# Altium footprint library SYNCBOX_V3I1.PcbLib: 251 footprints (part 6 of 16)
Each footprint in its own frame and in the unit in brackets; x right, y up, seen from the top. Pads: shape width x height; smd on the part's side, far side on the other; paste and mask are expansions set on the pad; w line width, h text height; cw(c..) or ccw(c..) is an arc to the next point about the centre after c.
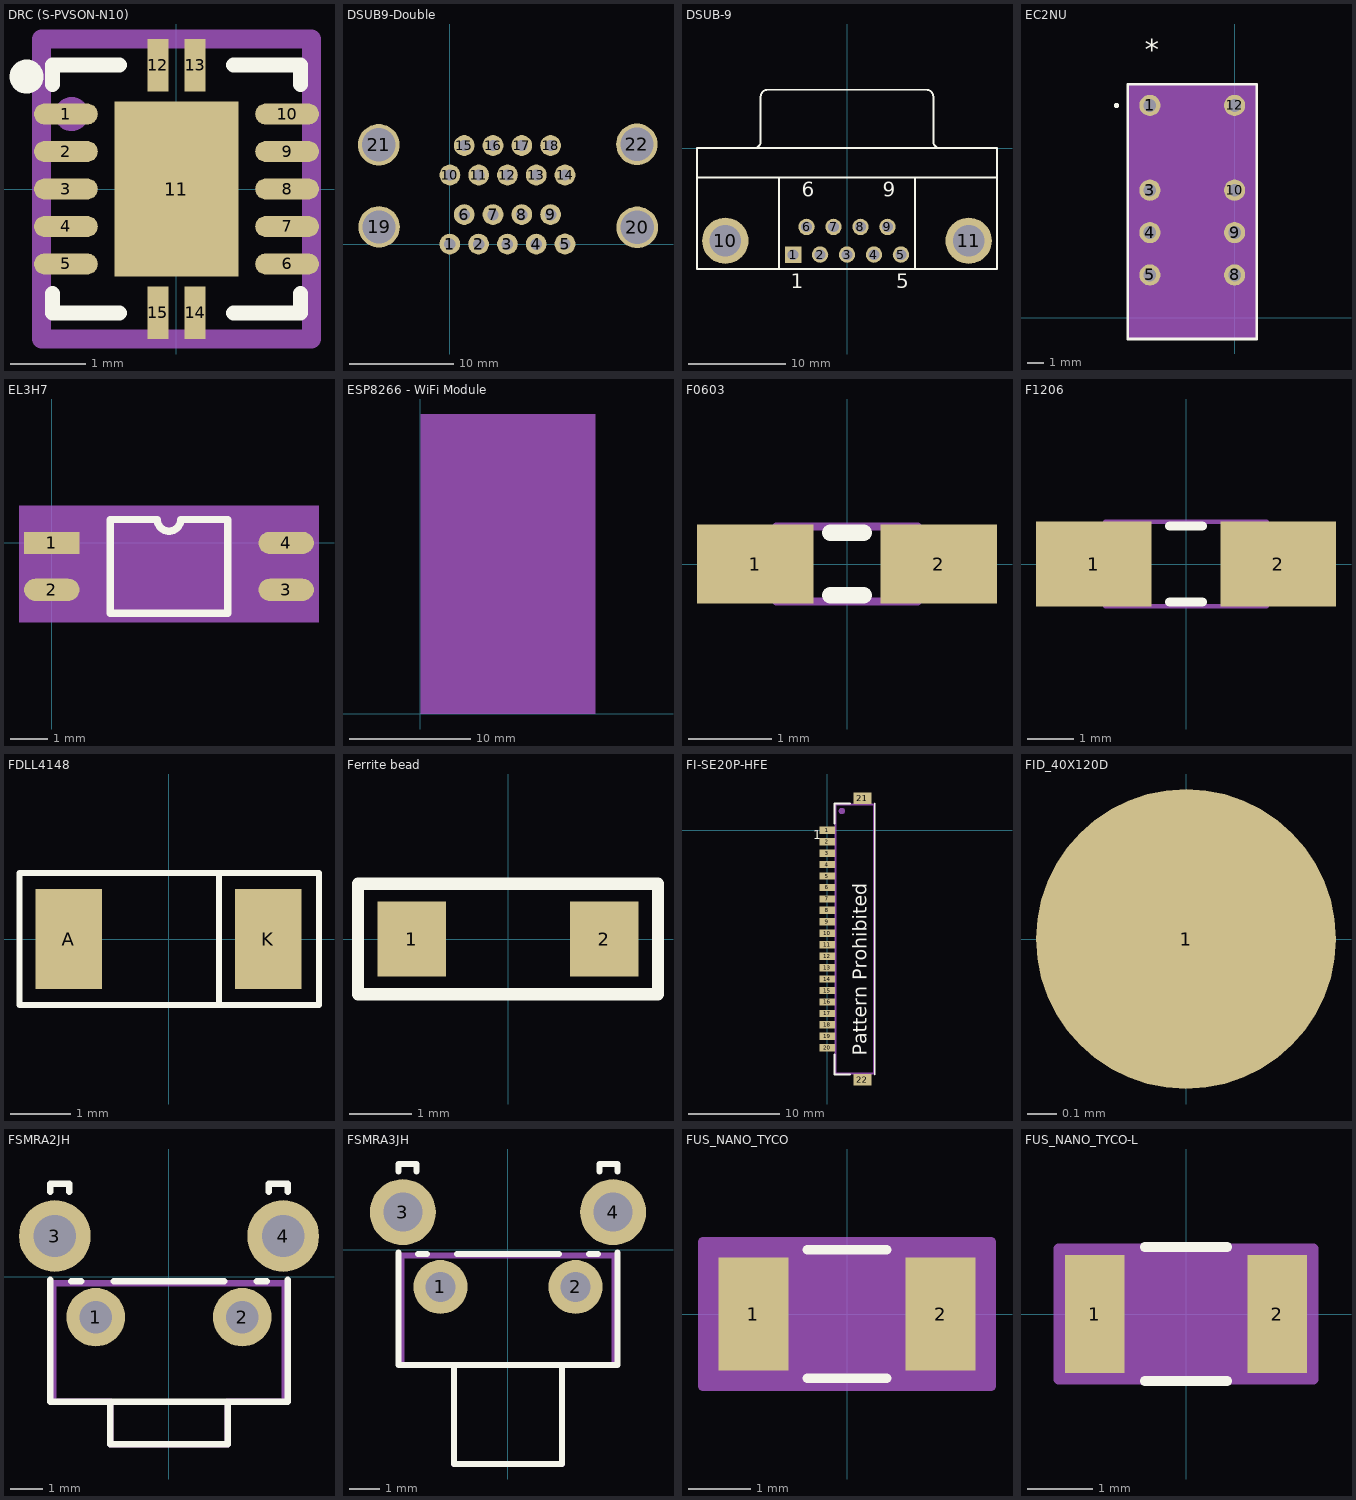
[diagram p5: the footprints below, top view; thin cyan lines are the x and y axes]

## DRC (S-PVSON-N10) [mm]
pads (15):
  oval 0.85x0.28 smd mask+0.025: 1(-1.475,1) 2(-1.475,0.5) 3(-1.475,0) 4(-1.475,-0.5) 5(-1.475,-1) 6(1.475,-1) 7(1.475,-0.5) 8(1.475,0) 9(1.475,0.5) 10(1.475,1)
  rect 1.65x2.337 smd paste-1.524 mask+0.025: 11(0,0)
  rect 0.28x0.7 smd mask+0.127: 12(-0.25,1.651) 13(0.25,1.651) 14(0.25,-1.651) 15(-0.25,-1.651)
Top Overlay:
  circle w0.254: c-2,1.5 r0.1
  lines w0.2: -1.651,-1.397 -1.651,-1.651 -0.762,-1.651 ; -1.651,1.397 -1.651,1.651 -0.762,1.651 ; 0.762,-1.651 1.651,-1.651 1.651,-1.397 ; 0.762,1.651 1.651,1.651 1.651,1.397
Top Paste:
  rectangle: -0.763,0.102 -0.102,1.143
  rectangle: -0.763,-1.143 -0.102,-0.102
  rectangle: 0.101,-1.143 0.761,-0.102
  rectangle: 0.101,0.102 0.761,1.143
Mechanical 16:
  circle w0.254: c-1.4,1 r0.1
  lines w0.254: -1.8,-2 1.8,-2 1.8,2 -1.8,2 -1.8,-2
Mechanical 29:
  text ".Designator" at -0.5,0.6 h1
3D body: height 1, standoff 0, extent -1.651,-1.651 1.651,1.651

## DSUB9-Double [mm] "Double Stacked D-Sub Connector 2x9"
pads (22):
  round 2 hole 1.1: 1(-0.01,-0.005) 2(2.765,-0.005) 3(5.54,-0.005) 4(8.315,-0.005) 5(11.09,0) 6(1.377,2.84) 7(4.152,2.84) 8(6.927,2.84) 9(9.702,2.84) 10(0,6.65) 11(2.772,6.65) 12(5.545,6.65) 13(8.317,6.65) 14(11.09,6.65) 15(1.377,9.49) 16(4.152,9.49) 17(6.927,9.49) 18(9.702,9.49)
  round 4 hole 3.2: 19(-6.82,1.65) 20(18.05,1.61) 21(-6.855,9.56) 22(18.02,9.61)
3D body "178-009-613.STEP": height 32.57, standoff -2.38, extent -9.815,-1.585 20.995,23.815

## DSUB-9 [mm] "Connector; D Subminiature; 9 Position; Right Angle; Pitch 1.385 mm"
height 12.75
pads (11):
  rect 1.69x1.69 hole 1.09: 1(-5.54,-10.92)
  round 1.69 hole 1.09: 2(-2.77,-10.92) 3(0,-10.92) 4(2.77,-10.92) 5(5.54,-10.92) 6(-4.155,-8.08) 7(-1.385,-8.08) 8(1.385,-8.08) 9(4.155,-8.08)
  round 4.76 hole 3.26: 10(-12.495,-9.5) 11(12.495,-9.5)
Top Overlay:
  lines w0.2: -15.4,-3 15.4,-3 ; -9.56,0.005 ccw(c-9.56,0.7) -8.865,0.7 -8.865,5.3 ; -8.86,5.305 cw(c-8.165,5.305) -8.165,6 8.165,6 cw(c8.165,5.305) 8.86,5.305 ; -7,-12.4 -7,-3 ; 7,-12.4 7,-3 ; 8.865,5.3 8.865,0.7 ccw(c9.56,0.7) 9.56,0.005 ; -15.4,-12.4 15.4,-12.4 15.4,0 -15.4,0 -15.4,-12.4
  text "6" at -4.655,-4.975 h1.5
  text "9" at 3.655,-4.975 h1.5
  text "5" at 5.04,-14.375 h1.5
  text "1" at -5.79,-14.375 h1.5
3D body "10090099-s094vlf.stp": height 12.54, standoff -3.78, extent -15.42,-12.4 15.42,5.8

## EC2NU [mil]
pads (8):
  round 50 / inner round 60 / far side round 50 hole 30 paste+0 mask+0: 1(-200,501) 3(-200,301) 4(-200,201) 5(-200,101) 8(0,101) 9(0,201) 10(0,301) 12(0,501)
Top Overlay:
  circle w6: c-279,501 r3
  lines w6: -252.5,-50 -252.5,551 52.5,551 52.5,-50 -252.5,-50
  text "*" at -212.5,607.67 h50
Mechanical 13:
  circle w0: c-175,501 r3
  lines w0: -112,546 ccw(c-100,546) -88,546
  lines w1: -247.5,-45 -247.5,546 47.5,546 47.5,-45 -247.5,-45
  text "*" at -212.5,517.67 h50
Mechanical 15:
  region: 47.5,-45 -247.5,-45 -247.5,546 47.5,546
  region: 49.5,-47 -249.5,-47 -249.5,548 49.5,548
  lines w6: -249.5,-47 49.5,-47 49.5,548 -249.5,548 -249.5,-47
3D body "EC2NU.stp": height 370.12, standoff -100, extent -247.48,-44.98 47.48,546
3D body: height 10, standoff 0, extent 0,0 10,10

## EL3H7 [mm]
pads (4):
  rect 1.5x0.6 smd: 1(0,0)
  oval 1.5x0.6 smd: 2(0,-1.27) 3(6.35,-1.27) 4(6.35,0)
Top Overlay:
  lines w0.2: 1.585,-1.905 1.585,0.635 2.857,0.635 ccw(c3.175,0.635) 3.492,0.635 4.765,0.635 4.765,-1.905 1.585,-1.905
Mechanical 15:
  rectangle: -0.889,-2.159 7.239,1.016
3D body "4_PIN_SSOP.STEP": height 1.9, standoff -0.04, extent -0.325,-1.985 6.675,0.715

## ESP8266 - WiFi Module [mm]
Mechanical 15:
  rectangle: 0,-0.025 14.503,24.816
3D body "13678.STEP": height 5.63, standoff -5.8, extent 0.003,-0.005 14.503,24.795

## F0603 [mm]
height 0.55
pads (2):
  rect 1.4x0.95 smd: 1(-1.1,0) 2(1.1,0)
Top Overlay:
  lines w0.2: -0.2,-0.375 0.2,-0.375 ; -0.2,0.375 0.2,0.375
Mechanical 13:
  lines w0.1: -0.85,-0.45 -0.85,0.45 0.85,0.45 0.85,-0.45 -0.85,-0.45
3D body: height 0.55, standoff 0, extent -0.85,-0.45 0.85,0.45

## F1206 [mm]
height 0.7
pads (2):
  rect 2.5x1.85 smd: 1(-2,0) 2(2,0)
Top Overlay:
  lines w0.2: -0.35,-0.825 0.35,-0.825 ; -0.35,0.825 0.35,0.825
Mechanical 13:
  lines w0.1: -1.75,-0.915 1.75,-0.915 1.75,0.915 -1.75,0.915 -1.75,-0.915
3D body: height 0.7, standoff 0, extent -1.75,-0.915 1.75,0.915

## FDLL4148 [mm]
pads (2):
  rect 1.1x1.65 smd: A(-1.65,0) K(1.65,0)
Top Overlay:
  lines w0.1: -2.464,1.092 -2.464,-1.092 2.489,-1.092 2.489,1.092 ; -2.438,1.092 2.489,1.092 ; 0.813,-1.092 0.838,-1.092 0.838,1.092 0.813,1.092 2.489,1.092

## Ferrite bead [mm]
pads (2):
  rect 1.1x1.2 smd: 1(-1.55,0) 2(1.55,0)
Top Overlay:
  lines w0.2: -2.413,-0.889 -2.413,0.587 -2.413,0.889 2.413,0.889 2.413,-0.889 -2.413,-0.889
3D body "STEP-WE-CBF-1206-rev1.stp": height 1.08, standoff -0.02, extent -1.6,-0.8 1.6,0.8

## FI-SE20P-HFE [mm]
pads (22):
  rect 1.7x0.8 smd: 1(0,0) 2(0,-1.25) 3(0,-2.5) 4(0,-3.75) 5(0,-5) 6(0,-6.25) 7(0,-7.5) 8(0,-8.75) 9(0,-10) 10(0,-11.25) 11(0,-12.5) 12(0,-13.75) 13(0,-15) 14(0,-16.25) 15(0,-17.5) 16(0,-18.75) 17(0,-20) 18(0,-21.25) 19(0,-22.5) 20(0,-23.75)
  rect 2x1.25 smd: 21(3.85,3.5) 22(3.85,-27.25)
Top Overlay:
  lines w0.2: 0.8,-24.45 0.8,-26.65 2.5,-26.65 ; 0.8,0.7 0.8,2.9 2.5,2.9 ; 5.2,-26.65 5.2,2.9
  text "Pattern Prohibited" at 4.3,-24.6 h1.52
  text "1" at -1.5,-1 h1.02
Mechanical 16:
  circle w0.5: c1.6,2.1 r0.1
  lines w0.2: 0.9,-26.55 5.1,-26.55 5.1,2.8 0.9,2.8 0.9,-26.55
Mechanical 29:
  text ".Designator" at 2.2,-10.5 h1.52
3D body "K3D-FI-SE20P-HFE-R1.STEP": height 2.11, standoff 0, extent -0.25,-27.275 5.1,3.475

## FID_40X120D [mil]
pads (1):
  round 40 smd paste-40 mask+40: 1(0,0)

## FSMRA2JH [mm]
pads (4):
  round 1.8 hole 1: 1(-2.25,-1.245) 2(2.25,-1.245)
  round 2.2 hole 1.3: 3(-3.505,1.245) 4(3.505,1.245)
Top Overlay:
  lines w0.2: -3.65,-0.1 -3.65,-3.845 3.65,-3.845 3.65,-0.1 ; -3.65,2.6 -3.65,2.85 -3.055,2.85 -3.055,2.6 ; -3,-0.145 -2.7,-0.145 ; -1.8,-3.845 -1.8,-5.145 1.8,-5.145 1.8,-3.845 ; -1.7,-0.145 1.7,-0.145 ; 2.7,-0.145 3,-0.145 ; 3.055,2.6 3.055,2.85 3.65,2.85 3.65,2.6
Mechanical 16:
  lines w0.2: -3.55,-3.845 -3.55,-0.2 3.55,-0.2 3.55,-3.845 1.8,-3.845 1.8,-5.145 -1.8,-5.145 -1.8,-3.845 -3.55,-3.845
Mechanical 29:
  text ".Designator" at -1.5,-2.5 h1.2
3D body "c-1825027-5-g1-3d.stp": height 7.05, standoff -3.47, extent -4.204,-5.094 4.204,2.767

## FSMRA3JH [mm]
pads (4):
  round 1.8 hole 1: 1(-2.25,-1.245) 2(2.25,-1.245)
  round 2.2 hole 1.3: 3(-3.505,1.245) 4(3.505,1.245)
Top Overlay:
  lines w0.2: -3.65,-0.1 -3.65,-3.845 3.65,-3.845 3.65,-0.1 ; -3.65,2.6 -3.65,2.85 -3.055,2.85 -3.055,2.6 ; -3,-0.145 -2.7,-0.145 ; -1.8,-3.845 -1.8,-7.145 1.8,-7.145 1.8,-3.845 ; -1.7,-0.145 1.7,-0.145 ; 2.7,-0.145 3,-0.145 ; 3.055,2.6 3.055,2.85 3.65,2.85 3.65,2.6
Mechanical 16:
  lines w0.2: -3.55,-3.845 -3.55,-0.2 3.55,-0.2 3.55,-3.845 1.8,-3.845 1.8,-7.145 -1.8,-7.145 -1.8,-3.845 -3.55,-3.845
Mechanical 29:
  text ".Designator" at -1.5,-2.5 h1.2
3D body "c-1825027-8-g1-3d.stp": height 7.05, standoff -3.47, extent -4.204,-7.101 4.204,2.741

## FUS_NANO_TYCO [mil]
pads (2):
  rect 44x71 smd paste+0 mask+0: 1(-59,0) 2(59,0)
Top Overlay:
  lines w6: -24.89,-40.5 24.89,-40.5 ; -24.89,40.5 24.89,40.5
Mechanical 13:
  lines w1: -67,-35.5 -67,35.5 ; -67,-35.5 67,-35.5 ; -67,-35.5 -37,-35.5 -37,35.5 -67,35.5 ; -67,-35.5 -67,35.5 ; -67,35.5 67,35.5 ; 67,-35.5 67,35.5 ; 67,-35.5 67,35.5 ; 67,-35.5 37,-35.5 37,35.5 67,35.5
Mechanical 15:
  region: 91,-45.5 -91,-45.5 -91,45.5 91,45.5
  lines w6: -91,-45.5 91,-45.5 91,45.5 -91,45.5 -91,-45.5
3D body: height 10, standoff 0, extent 0,0 10,10
3D body "FUS_NANO_TYCO.step": height 39.02, standoff 0, extent -67.01,-35.51 67.01,35.52

## FUS_NANO_TYCO-L [mil]
pads (2):
  rect 36x71 smd paste+0 mask+0: 1(-55,0) 2(55,0)
Top Overlay:
  lines w6: -24.89,-40.5 24.89,-40.5 ; -24.89,40.5 24.89,40.5
Mechanical 13:
  lines w1: -67,-35.5 -67,35.5 ; -67,-35.5 67,-35.5 ; -67,-35.5 -37,-35.5 -37,35.5 -67,35.5 ; -67,-35.5 -67,35.5 ; -67,35.5 67,35.5 ; 67,-35.5 67,35.5 ; 67,-35.5 67,35.5 ; 67,-35.5 37,-35.5 37,35.5 67,35.5
Mechanical 15:
  region: 77,-39.5 -77,-39.5 -77,39.5 77,39.5
  lines w6: -77,-39.5 77,-39.5 77,39.5 -77,39.5 -77,-39.5
3D body: height 10, standoff 0, extent 0,0 10,10
3D body "FUS_NANO_TYCO-L.step": height 39.02, standoff 0, extent -67,-35.51 67.01,35.51